# Altium schematic symbol library GRM32ER71A226KE20L.SchLib: 1 symbol
Pins are listed as number, name and electrical type; pins without a type are passive.

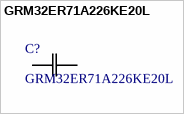
[diagram p0: symbol GRM32ER71A226KE20L]

## GRM32ER71A226KE20L
designator C?
Description; Manufacturer_Name: Murata; Copyright: Copyright (C) 2025 Ultra Librarian. All rights reserved.; Manufacturer_Part_Number: GRM32ER71A226KE20L
footprint CAP_GRM32ED_MUR
pins: 1, 2